# Altium schematic symbol library TPD2EUSB30ADRTR.SchLib: 1 symbol
Pins are listed as number, name and electrical type; pins without a type are passive.

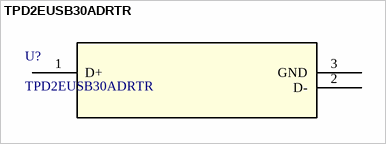
[diagram p0: symbol TPD2EUSB30ADRTR]

## TPD2EUSB30ADRTR
designator U?
Dual 0.7-pF, 3.6-V, &plusmn;8-kV ESD protection diode with 5-A surge rating for USB 3.0 3-SOT-9X3 -40 to 85; Manufacturer_Name: Texas Instruments; Copyright: Copyright (C) 2026 Ultra Librarian. All rights reserved.; Manufacturer_Part_Number: TPD2EUSB30ADRTR; RefDes: RefDes; Type: Type
footprint DRT3
pins: 1 D+, 2 D-, 3 GND (power)